# Altium schematic symbol library LCSC3D.SchLib: 2 symbols
Pins are listed as number, name and electrical type; pins without a type are passive.

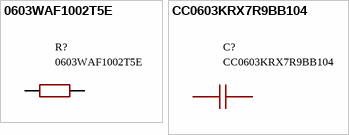
[diagram p0: symbols 0603WAF1002T5E to CC0603KRX7R9BB104]

## 0603WAF1002T5E
designator R?
10KΩ (1002) ±1%; Manufacturer: UNI-ROYAL(厚声); nameAlias: Value; SupplierPart: C25804; ManufacturerPart: 0603WAF1002T5E; Footprint: R0603; Source: JLCEDA/EasyEDA Official Library; JLCEDA: https://lceda.cn/; EasyEDA: https://easyeda.com/; Supplier: LCSC; Manufacturer Part: 0603WAF1002T5E; Supplier Part: C25804; Value: 10kΩ; JLCPCB Part Class: Basic Part
footprint R0603
pins: 1, 2

## CC0603KRX7R9BB104
designator C?
100nF (104) ±10% 50V; Manufacturer: YAGEO(国巨); nameAlias: Value; SupplierPart: C14663; ManufacturerPart: CC0603KRX7R9BB104; Footprint: C0603; Source: JLCEDA/EasyEDA Official Library; JLCEDA: https://lceda.cn/; EasyEDA: https://easyeda.com/; Supplier: LCSC; Manufacturer Part: CC0603KRX7R9BB104; Value: 100nF; Supplier Part: C14663; JLCPCB Part Class: Basic Part
footprint C0603
pins: 1, 2